# EAGLE library part NHD-0216K1Z-FSB-FBW-L (library NHD-0216K1Z-FSB-FBW-L)
Character Display Module Transflective 5 x 8 Dots FSTN - Film Super-Twisted Nematic LED - Blue Parallel 80.00mm x 36.00mm x 13.50mm,-20C ~ 70C Source: Datasheet <https://www.digikey.com/en/products/detail/newhaven-display-intl/NHD-0216K1Z-FSB-FBW-L/1701181?msockid=07b6a70c65cf63c135a0b17364d56200>
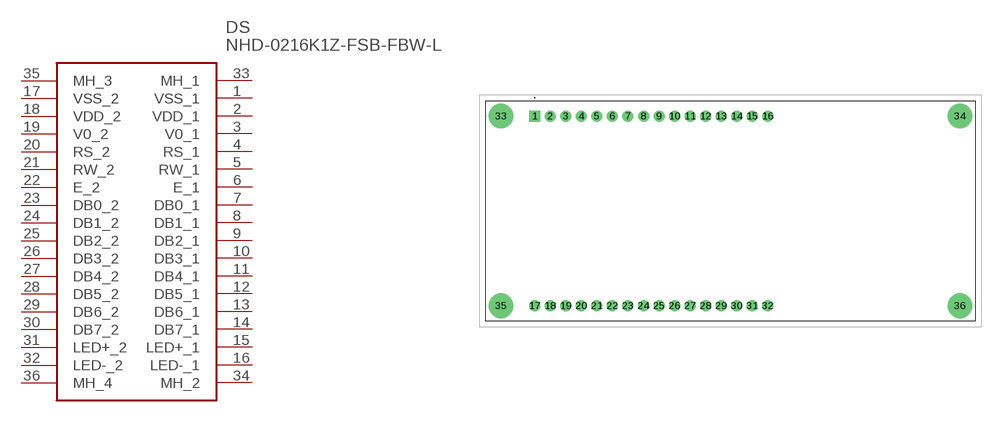
[diagram p0: symbol with the pads of NHD0216K1ZFSBFBWL; footprint NHD0216K1ZFSBFBWL]

Designator prefix DS

## NHD-0216K1Z-FSB-FBW-L (Description: Character Display Module Transflective 5 x 8 Dots FSTN - Film Super-Twisted Nematic LED - Blue Parallel 80.00mm x 36.00mm x 13.50mm,-20C ~ 70C; Height: 13.5mm; Manufacturer_Name: Newhaven Display; Manufacturer_Part_Number: NHD-0216K1Z-FSB-FBW-L; Mouser_Part_Number: 763-0216K1Z-FSB-FBW; Mouser_Price-Stock: https://www.mouser.co.uk/ProductDetail/Newhaven-Display/NHD-0216K1Z-FSB-FBW-L?qs=3vk7fz9CmNz%2FJwPuhj3GIw%3D%3D)  [NHD0216K1ZFSBFBWL]
1  VSS_1
2  VDD_1
3  V0_1
4  RS_1
5  RW_1
6  E_1
7  DB0_1
8  DB1_1
9  DB2_1
10  DB3_1
11  DB4_1
12  DB5_1
13  DB6_1
14  DB7_1
15  LED+_1
16  LED-_1
17  VSS_2
18  VDD_2
19  V0_2
20  RS_2
21  RW_2
22  E_2
23  DB0_2
24  DB1_2
25  DB2_2
26  DB3_2
27  DB4_2
28  DB5_2
29  DB6_2
30  DB7_2
31  LED+_2
32  LED-_2
33  MH_1
34  MH_2
35  MH_3
36  MH_4

## Footprint NHD0216K1ZFSBFBWL (pad centres in mm)
NHD-0216K1Z-FSB-FBW-L-2
drill 1.2 pad 1.8 square: 1 0,0
drill 1.2 pad 1.8: 2 2.54,0; 3 5.08,0; 4 7.62,0; 5 10.16,0; 6 12.7,0; 7 15.24,0; 8 17.78,0; 9 20.32,0; 10 22.86,0; 11 25.4,0; 12 27.94,0; 13 30.48,0; 14 33.02,0; 15 35.56,0; 16 38.1,0; 17 0,-31; 18 2.54,-31; 19 5.08,-31; 20 7.62,-31; 21 10.16,-31; 22 12.7,-31; 23 15.24,-31; 24 17.78,-31; 25 20.32,-31; 26 22.86,-31; 27 25.4,-31; 28 27.94,-31; 29 30.48,-31; 30 33.02,-31; 31 35.56,-31; 32 38.1,-31
drill 2.7 pad 4.05: 33 -5.5,0; 34 69.5,0; 35 -5.5,-31; 36 69.5,-31